# Altium footprint library Module_DIY.PcbLib: 6 footprints
Each footprint in its own frame and in the unit in brackets; x right, y up, seen from the top. Pads: shape width x height; smd on the part's side, far side on the other; paste and mask are expansions set on the pad; w line width, h text height; cw(c..) or ccw(c..) is an arc to the next point about the centre after c.
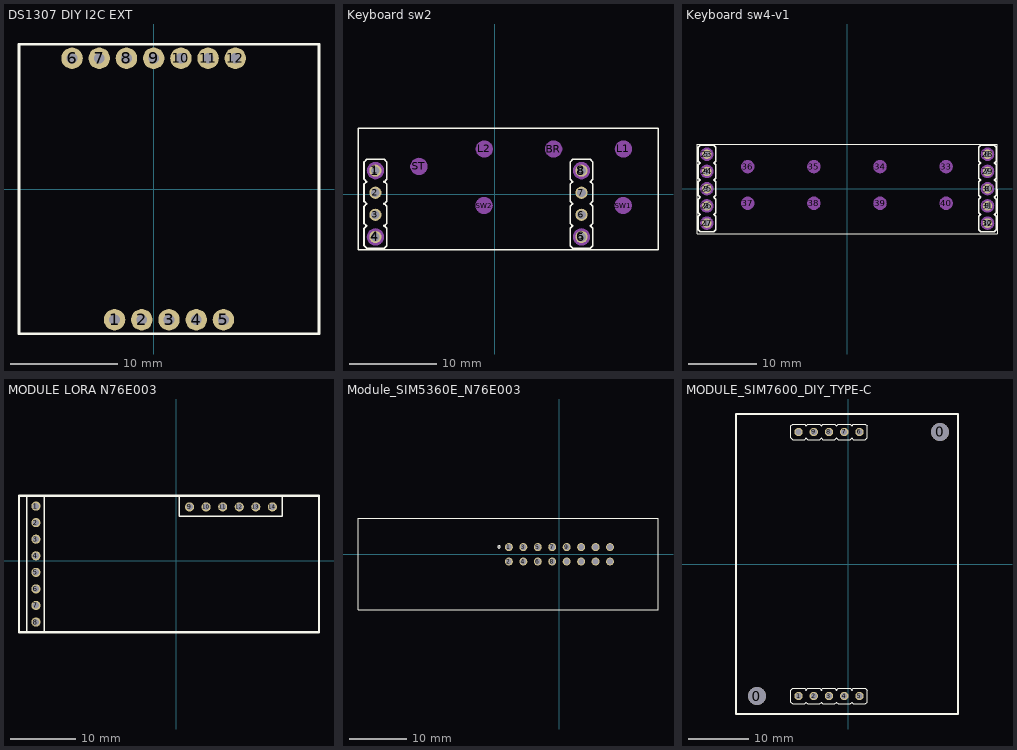
[diagram p0: the footprints below, top view; thin cyan lines are the x and y axes]

## DS1307 DIY I2C EXT [mm]
pads (12):
  round 2 hole 1 mask+0.102: 1(-3.65,-12.2) 2(-1.11,-12.2) 3(1.43,-12.2) 4(3.97,-12.2) 5(6.51,-12.2) 6(-7.62,12.2) 7(-5.08,12.2) 8(-2.54,12.2) 9(0,12.2) 10(2.54,12.2) 11(5.08,12.2) 12(7.62,12.2)
Top Overlay:
  lines w0.254: -12.57,-13.5 15.43,-13.5 15.43,13.5 -12.57,13.5 -12.57,-13.5
Top Designator:
  text ".Designator" at -2.28,-16.282 h1.52
Mechanical 6:
  text ".Designator" at -6.09,-0.565 h2.5
3D body "female_header_a-bl254-eg-g05d.stp": height 8.6, standoff -3.1, extent -5.045,-13.45 7.905,-10.95
3D body "female_header_a-bl254-eg-g05d.stp": height 8.6, standoff -3.1, extent -9.015,10.95 3.935,13.45
3D body "female_header_a-bl254-eg-g05d.stp": height 8.6, standoff -3.1, extent -3.935,10.95 9.015,13.45
3D body "RealTime_I2C.step": height 17.95, standoff 2.48, extent -10.476,-46.077 15.524,14.2

## Keyboard sw2 [mm]
pads (18):
  round 1.4 / inner round 1.4 / far side oval 2.2x1.4 hole 1 mask+0.1: 1(-13.748,2.73) 2(-13.748,0.19) 3(-13.748,-2.35) 4(-13.748,-4.89) 5(9.952,-4.89) 6(9.952,-2.35) 7(9.952,0.19) 8(9.952,2.73)
  round 2 on Mech15: 1(-13.748,2.73) 4(-13.748,-4.89) 6(9.952,-4.89) 8(9.952,2.73) BR(6.752,5.22) L1(14.777,5.22) L2(-1.223,5.22) ST(-8.748,3.22) SW1(14.752,-1.28) SW2(-1.248,-1.28)
Top Overlay:
  lines w0.15: -15.748,-6.38 18.752,-6.38 18.752,7.62 -15.748,7.62 -15.748,-6.38
  lines w0.2: -14.748,-3.65 -15.048,-3.35 -15.048,-1.35 -14.748,-1.05 ; -14.748,-3.59 -15.048,-3.89 -15.048,-5.89 -14.748,-6.19 -12.748,-6.19 -12.448,-5.89 -12.448,-3.89 -12.748,-3.59 ; -14.748,-1.11 -15.048,-0.81 -15.048,1.19 -14.748,1.49 ; -14.748,1.43 -15.048,1.73 -15.048,3.73 -14.748,4.03 -12.748,4.03 -12.448,3.73 -12.448,1.73 -12.748,1.43 ; -12.748,-3.65 -12.448,-3.35 -12.448,-1.35 -12.748,-1.05 ; -12.748,-1.11 -12.448,-0.81 -12.448,1.19 -12.748,1.49 ; 8.952,-3.65 8.652,-3.35 8.652,-1.35 8.952,-1.05 ; 8.952,-3.59 8.652,-3.89 8.652,-5.89 8.952,-6.19 10.952,-6.19 11.252,-5.89 11.252,-3.89 10.952,-3.59 ; 8.952,-1.11 8.652,-0.81 8.652,1.19 8.952,1.49 ; 8.952,1.43 8.652,1.73 8.652,3.73 8.952,4.03 10.952,4.03 11.252,3.73 11.252,1.73 10.952,1.43 ; 10.952,-3.65 11.252,-3.35 11.252,-1.35 10.952,-1.05 ; 10.952,-1.11 11.252,-0.81 11.252,1.19 10.952,1.49
Top Designator:
  text ".Designator" at -2.208,0.276 h1.52
3D body "pin_header_aw140-eg-g02a.stp": height 12.02, standoff -0.38, extent -14.998,-6.16 -12.498,-1.18
3D body "pin_header_aw140-eg-g02a.stp": height 12.02, standoff -0.38, extent -14.998,-1.08 -12.498,3.9
3D body "pin_header_aw140-eg-g02a.stp": height 12.02, standoff -0.38, extent -14.998,-3.62 -12.498,1.36
3D body "pin_header_aw140-eg-g02a.stp": height 10.32, standoff -2.08, extent -14.998,-6.16 -12.498,-1.18
3D body "pin_header_aw140-eg-g02a.stp": height 10.32, standoff -2.08, extent -14.998,-1.08 -12.498,3.9
3D body "pin_header_aw140-eg-g02a.stp": height 10.32, standoff -2.08, extent -14.998,-3.62 -12.498,1.36
3D body "pin_header_aw140-eg-g02a.stp": height 8.72, standoff -3.68, extent -14.998,-6.16 -12.498,-1.18
3D body "pin_header_aw140-eg-g02a.stp": height 8.72, standoff -3.68, extent -14.998,-3.62 -12.498,1.36
3D body "pin_header_aw140-eg-g02a.stp": height 8.72, standoff -3.68, extent -14.998,-1.08 -12.498,3.9
3D body "pin_header_aw140-eg-g02a.stp": height 12.02, standoff -0.38, extent 8.702,-6.16 11.202,-1.18
3D body "pin_header_aw140-eg-g02a.stp": height 12.02, standoff -0.38, extent 8.702,-1.08 11.202,3.9
3D body "pin_header_aw140-eg-g02a.stp": height 12.02, standoff -0.38, extent 8.702,-3.62 11.202,1.36
3D body "pin_header_aw140-eg-g02a.stp": height 10.32, standoff -2.08, extent 8.702,-6.16 11.202,-1.18
3D body "pin_header_aw140-eg-g02a.stp": height 10.32, standoff -2.08, extent 8.702,-1.08 11.202,3.9
3D body "pin_header_aw140-eg-g02a.stp": height 10.32, standoff -2.08, extent 8.702,-3.62 11.202,1.36
3D body "pin_header_aw140-eg-g02a.stp": height 8.72, standoff -3.68, extent 8.702,-6.16 11.202,-1.18
3D body "pin_header_aw140-eg-g02a.stp": height 8.72, standoff -3.68, extent 8.702,-3.62 11.202,1.36
3D body "pin_header_aw140-eg-g02a.stp": height 8.72, standoff -3.68, extent 8.702,-1.08 11.202,3.9
3D body "pcb.step": height 33, standoff 10.68, extent -15.748,-6.38 18.752,7.62

## Keyboard sw4-v1 [mm]
pads (28):
  round 1.4 / inner round 1.4 / far side oval 2.2x1.4 hole 1 mask+0.1: 1(-20.7,-5.08) 2(-20.7,-2.54) 3(-20.7,0) 4(-20.7,2.54) 5(-20.7,5.08) 6(20.7,5.08) 7(20.7,2.54) 8(20.7,0) 9(20.7,-2.54) 10(20.7,-5.08)
  round 2 on Mech15: 23(-20.7,5.08) 24(-20.7,2.54) 25(-20.7,0) 26(-20.7,-2.54) 27(-20.7,-5.08) 28(20.7,5.08) 29(20.7,2.54) 30(20.7,0) 31(20.7,-2.54) 32(20.7,-5.08) 33(14.6,3.25) 34(4.843,3.25) 35(-4.913,3.25) 36(-14.67,3.25) 37(-14.67,-2.15) 38(-4.913,-2.15) 39(4.843,-2.15) 40(14.6,-2.15)
Top Overlay:
  lines w0.15: -22.15,-6.672 -22.15,6.578 22.1,6.578 22.1,-6.672 -22.15,-6.672
  lines w0.2: -21.7,-3.84 -22,-3.54 -22,-1.54 -21.7,-1.24 ; -21.7,-3.78 -22,-4.08 -22,-6.08 -21.7,-6.38 -19.7,-6.38 -19.4,-6.08 -19.4,-4.08 -19.7,-3.78 ; -21.7,-1.3 -22,-1 -22,1 -21.7,1.3 ; -21.7,1.24 -22,1.54 -22,3.54 -21.7,3.84 ; -21.7,3.78 -22,4.08 -22,6.08 -21.7,6.38 -19.7,6.38 -19.4,6.08 -19.4,4.08 -19.7,3.78 ; -19.7,-3.84 -19.4,-3.54 -19.4,-1.54 -19.7,-1.24 ; -19.7,-1.3 -19.4,-1 -19.4,1 -19.7,1.3 ; -19.7,1.24 -19.4,1.54 -19.4,3.54 -19.7,3.84 ; 19.7,-3.84 19.4,-3.54 19.4,-1.54 19.7,-1.24 ; 19.7,-3.78 19.4,-4.08 19.4,-6.08 19.7,-6.38 21.7,-6.38 22,-6.08 22,-4.08 21.7,-3.78 ; 19.7,-1.3 19.4,-1 19.4,1 19.7,1.3 ; 19.7,1.24 19.4,1.54 19.4,3.54 19.7,3.84 ; 19.7,3.78 19.4,4.08 19.4,6.08 19.7,6.38 21.7,6.38 22,6.08 22,4.08 21.7,3.78 ; 21.7,-3.84 22,-3.54 22,-1.54 21.7,-1.24 ; 21.7,-1.3 22,-1 22,1 21.7,1.3 ; 21.7,1.24 22,1.54 22,3.54 21.7,3.84
Top Designator:
  text ".Designator" at -3.735,-0.391 h1.52
3D body "VinaFE_KeyBoard_V10_pcb.step": height 22, standoff -0.32, extent -22.15,-6.672 22.1,6.578

## MODULE LORA N76E003 [mm]
pads (14):
  round 1.4 / inner round 1.4 / far side oval 2.2x1.4 hole 1 mask+0.1: 1(-21.53,8.413) 2(-21.53,5.873) 3(-21.53,3.333) 4(-21.53,0.793) 5(-21.53,-1.747) 6(-21.53,-4.287) 7(-21.53,-6.827) 8(-21.53,-9.367)
  round 1.4 / inner round 1.4 / far side oval 1.4x2.2 hole 1 mask+0.1: 9(2.02,8.283) 10(4.56,8.283) 11(7.1,8.283) 12(9.64,8.283) 13(12.18,8.283) 14(14.72,8.283)
Top Overlay:
  lines w0.2: -22.93,-10.877 -22.93,9.923 ; -20.23,-10.877 -20.23,9.923 ; 0.47,6.883 16.27,6.883 16.27,10.033 0.47,10.033 0.47,6.883
  lines w0.381: -24.13,-10.967 -24.13,10.033 21.87,10.033 21.87,-10.967 -24.13,-10.967
Top Designator:
  text ".Designator" at -0.021,-0.811 h1.52
3D body "female_header_a-bl254-eg-g08d.stp": height 8.5, standoff -3.2, extent -22.78,-10.76 -20.28,9.81
3D body "female_header_a-bl254-eg-g06d.stp": height 8.5, standoff -3.2, extent 0.623,7.033 16.113,9.533
3D body "pcb.step": height 18.1, standoff 2.8, extent -24.13,-10.967 31.7,10.033

## Module_SIM5360E_N76E003 [mm]
pads (16):
  round 1.4 / inner round 1.4 / far side oval 1.4x2.2 hole 1: 1(-8.89,1.27) 2(-8.89,-1.27) 3(-6.35,1.27) 4(-6.35,-1.27) 5(-3.81,1.27) 6(-3.81,-1.27) 7(-1.27,1.27) 8(-1.27,-1.27) 9(1.27,1.27) 10(1.27,-1.27) 11(3.81,1.27) 12(3.81,-1.27) 13(6.35,1.27) 14(6.35,-1.27) 15(8.89,1.27) 16(8.89,-1.27)
Top Overlay:
  circle w0.2: c-10.62,1.3 r0.2
  lines w0.2: -35.408,-9.754 17.323,-9.754 17.323,6.35 -35.408,6.35 -35.408,-9.754
Top Designator:
  text ".Designator" at -12.753,-2.046 h1.52
3D body "PCB_SIM5360E_CALL_SMS_pcb.step": height 123.5, standoff 0.56, extent -35.414,-9.752 17.331,6.35
3D body "PBD-2.stp": height 8.5, standoff -3.15, extent -7.62,-2.54 -5.08,2.54
3D body "PBD-2.stp": height 8.5, standoff -3.15, extent -10.16,-2.54 -7.62,2.54
3D body "PBD-2.stp": height 8.5, standoff -3.15, extent -2.54,-2.54 0,2.54
3D body "PBD-2.stp": height 8.5, standoff -3.15, extent -5.08,-2.54 -2.54,2.54
3D body "PBD-2.stp": height 8.5, standoff -3.15, extent 2.54,-2.54 5.08,2.54
3D body "PBD-2.stp": height 8.5, standoff -3.15, extent 0,-2.54 2.54,2.54
3D body "PBD-2.stp": height 8.5, standoff -3.15, extent 7.62,-2.54 10.16,2.54
3D body "PBD-2.stp": height 8.5, standoff -3.15, extent 5.08,-2.54 7.62,2.54

## MODULE_SIM7600_DIY_TYPE-C [mm]
pads (12):
  round 3 hole 3: 0(-15.25,-22) 0(15.25,22)
  round 1.4 / inner round 1.4 / far side oval 1.4x2.2 hole 1 mask+0.1: 1(-8.33,-22) 2(-5.79,-22) 3(-3.25,-22) 4(-0.71,-22) 5(1.83,-22) 6(1.83,22) 7(-0.71,22) 8(-3.25,22) 9(-5.79,22) 10(-8.33,22)
Top Overlay:
  lines w0.2: -7.09,-23 -6.79,-23.3 -4.79,-23.3 -4.49,-23 ; -7.09,-21 -6.79,-20.7 -4.79,-20.7 -4.49,-21 ; -7.09,21 -6.79,20.7 -4.79,20.7 -4.49,21 ; -7.09,23 -6.79,23.3 -4.79,23.3 -4.49,23 ; -7.03,-23 -7.33,-23.3 -9.33,-23.3 -9.63,-23 -9.63,-21 -9.33,-20.7 -7.33,-20.7 -7.03,-21 ; -7.03,21 -7.33,20.7 -9.33,20.7 -9.63,21 -9.63,23 -9.33,23.3 -7.33,23.3 -7.03,23 ; -4.55,-23 -4.25,-23.3 -2.25,-23.3 -1.95,-23 ; -4.55,-21 -4.25,-20.7 -2.25,-20.7 -1.95,-21 ; -4.55,21 -4.25,20.7 -2.25,20.7 -1.95,21 ; -4.55,23 -4.25,23.3 -2.25,23.3 -1.95,23 ; -2.01,-23 -1.71,-23.3 0.29,-23.3 0.59,-23 ; -2.01,-21 -1.71,-20.7 0.29,-20.7 0.59,-21 ; -2.01,21 -1.71,20.7 0.29,20.7 0.59,21 ; -2.01,23 -1.71,23.3 0.29,23.3 0.59,23 ; 0.53,-23 0.83,-23.3 2.83,-23.3 3.13,-23 3.13,-21 2.83,-20.7 0.83,-20.7 0.53,-21 ; 0.53,21 0.83,20.7 2.83,20.7 3.13,21 3.13,23 2.83,23.3 0.83,23.3 0.53,23
  lines w0.381: -18.75,-25 -18.75,25 18.25,25 18.25,-25 -18.75,-25
Top Designator:
  text ".Designator" at -3.96,-0.344 h1.52
3D body "female_header_a-bl254-eg-g05d.stp": height 8.5, standoff -3.2, extent -9.725,20.75 3.225,23.25
3D body "female_header_a-bl254-eg-g05d.stp": height 8.5, standoff -3.2, extent -9.725,-23.25 3.225,-20.75
3D body "Hex Spacer MF M3 L11mm.stp": height 11, standoff -6, extent -17.75,-24.887 -12.75,-19.113
3D body "Hex Spacer MF M3 L11mm.stp": height 11, standoff -6, extent 12.75,19.113 17.75,24.887
3D body "pcb.step": height 15.68, standoff 2.18, extent -18.75,-25 18.25,25